# Altium schematic symbol library MMBZ12VALYT116.SchLib: 1 symbol
Pins are listed as number, name and electrical type; pins without a type are passive.

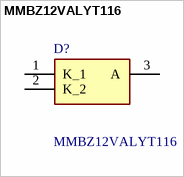
[diagram p0: symbol MMBZ12VALYT116]

## MMBZ12VALYT116
designator D?
8.5V, SOT-23, Dual Line, Anode Common Transient Voltage Suppressor; Manufacturer_Name: ROHM Semiconductor; Geometry.Height: 1.15mm; Manufacturer_Part_Number: MMBZ12VALYT116; Mouser Part Number: 755-MMBZ12VALYT116; Mouser Price/Stock: https://www.mouser.co.uk/ProductDetail/ROHM-Semiconductor/MMBZ12VALYT116?qs=QNEnbhJQKvYQxyBM5QcKxw%3D%3D; Arrow Part Number: *; Arrow Price/Stock: *; Datasheet Link: https://fscdn.rohm.com/en/products/databook/datasheet/discrete/diode/zener/mmbz12valyt116-e.pdf
footprint SOT95P240X115-3N
pins: 1 K_1, 2 K_2, 3 A